# EAGLE library part TLV76733DGNR (library TLV76733DGNR)
LDO Voltage Regulators 1-A, 16-V, high-PSRR, high-accuracy, low-dropout voltage regulator with enable Source: Datasheet <https://www.ti.com/lit/ds/symlink/tlv767.pdf?ts=1601893180135&ref_url=https%3A%2F%2Fduckduckgo.com%2F>
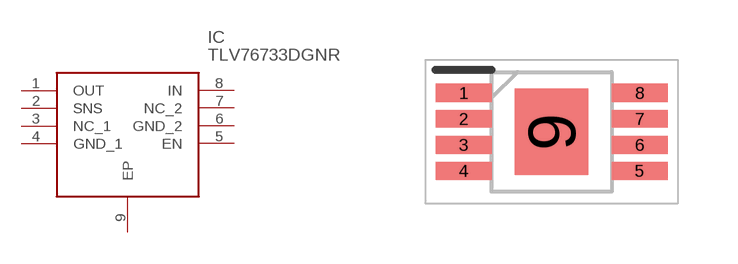
[diagram p0: symbol with the pads of SOP65P490X110-9N; footprint SOP65P490X110-9N]

Designator prefix IC

## TLV76733DGNR (Arrow_Part_Number: TLV76733DGNR; Arrow_Price-Stock: https://www.arrow.com/en/products/tlv76733dgnr/texas-instruments?region=nac; Description: LDO Voltage Regulators 1-A, 16-V, high-PSRR, high-accuracy, low-dropout voltage regulator with enable; Height: 1.1mm; Manufacturer_Name: Texas Instruments; Manufacturer_Part_Number: TLV76733DGNR; Mouser_Part_Number: 595-TLV76733DGNR; Mouser_Price-Stock: https://www.mouser.co.uk/ProductDetail/Texas-Instruments/TLV76733DGNR?qs=W%2FMpXkg%252BdQ7WCurh%2FfEdlw%3D%3D)  [SOP65P490X110-9N]
1  OUT
2  SNS
3  NC_1
4  GND_1
5  EN
6  GND_2
7  NC_2
8  IN
9  EP

## Footprint SOP65P490X110-9N (pad centres in mm)
TLV76733DGNR-DGN
smd 1.4 x 0.45: 1 -2.2,0.975; 2 -2.2,0.325; 3 -2.2,-0.325; 4 -2.2,-0.975; 5 2.2,-0.975; 6 2.2,-0.325; 7 2.2,0.325; 8 2.2,0.975
smd 1.846 x 2.15: 9 0,0